# Altium footprint library basicfootprints.PcbLib: 522 footprints (part 26 of 33)
Each footprint in its own frame and in the unit in brackets; x right, y up, seen from the top. Pads: shape width x height; smd on the part's side, far side on the other; paste and mask are expansions set on the pad; w line width, h text height; cw(c..) or ccw(c..) is an arc to the next point about the centre after c.
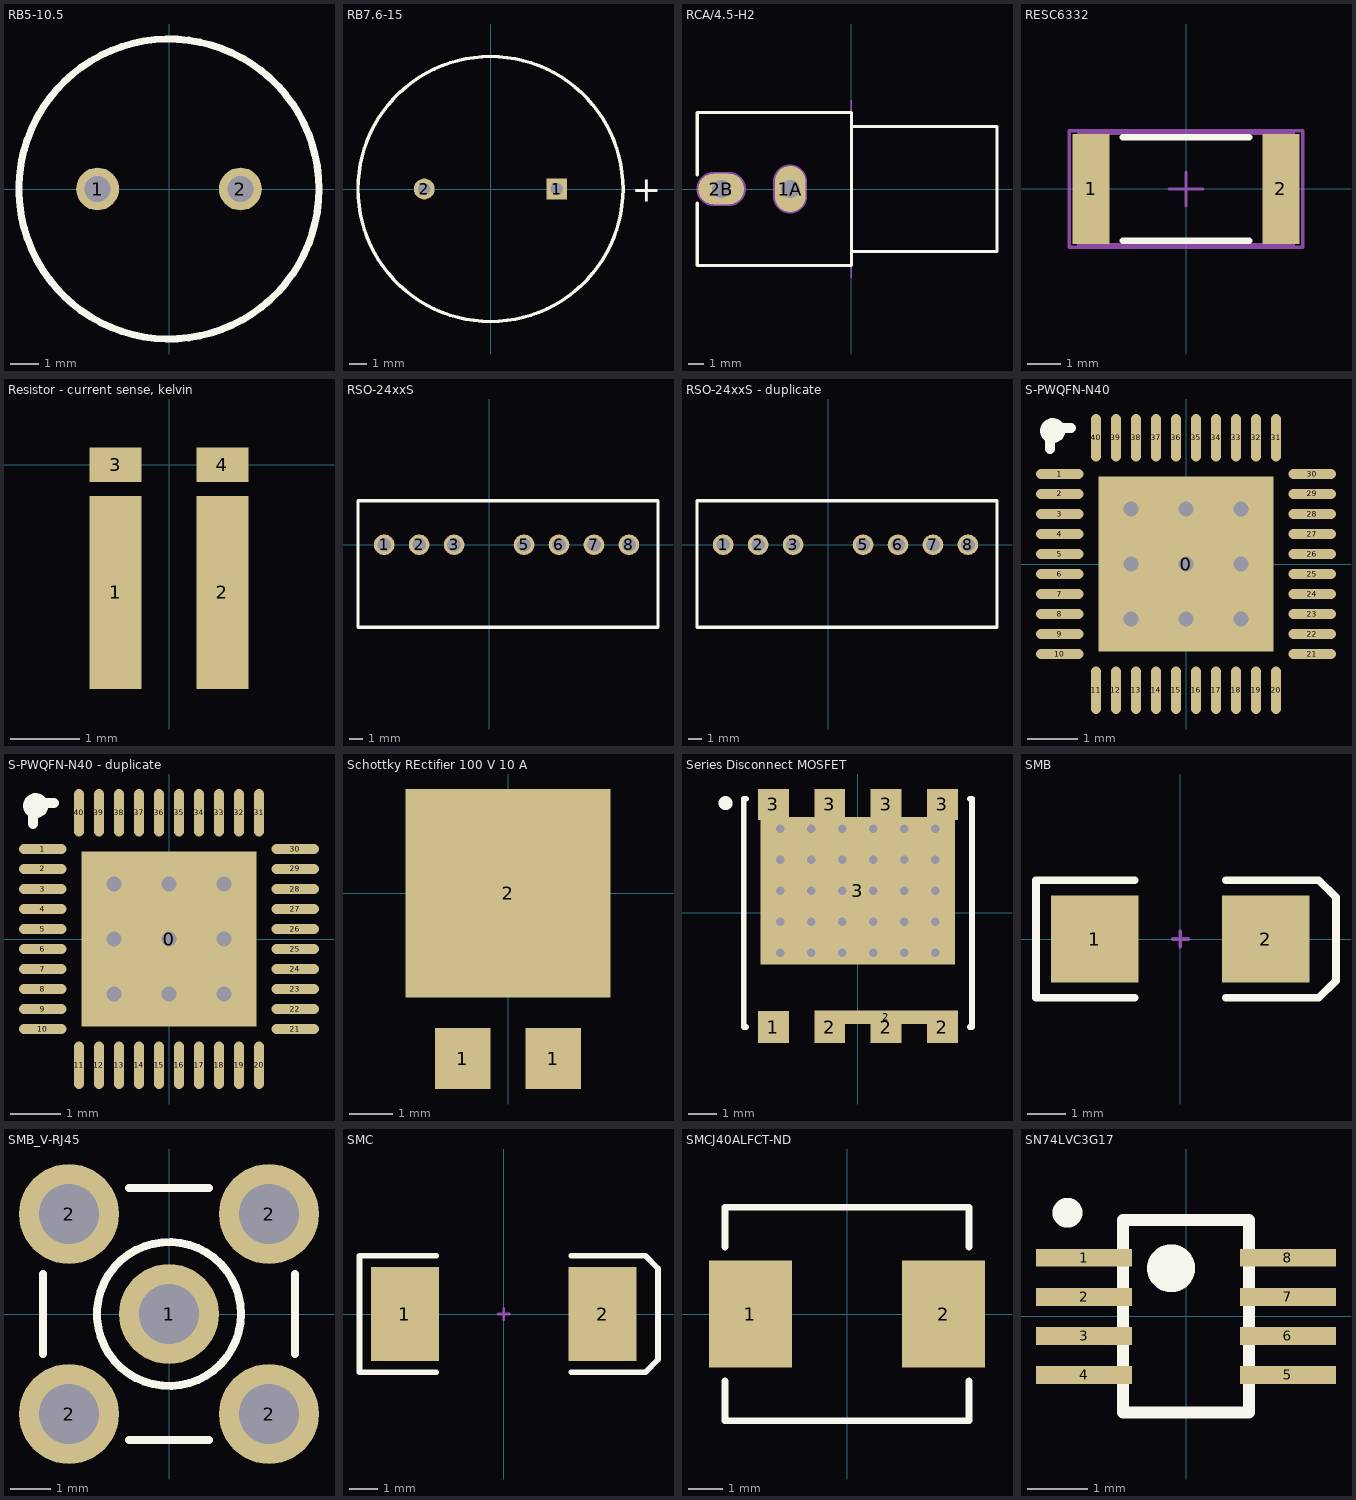
[diagram p25: the footprints below, top view; thin cyan lines are the x and y axes]

## RB5-10.5 [mm] "Capacitor (Radial); 2 Leads"
pads (2):
  round 1.5 hole 0.9: 1(-2.5,0) 2(2.5,0)
Top Overlay:
  circle w0.25: c0,0 r5.25
Mechanical 1:
  circle w0.02: c0,0 r5.25

## RB7.6-15 [mm] "Polarized Capacitor (Radial); 2 Leads"
pads (2):
  rect 1.2x1.2 hole 0.7: 1(3.81,0)
  round 1.2 hole 0.7: 2(-3.81,0)
Top Overlay:
  circle w0.2: c0,0 r7.62
  text "+" at 8.132,-0.737 h1.5

## RCA/4.5-H2 [mm] "Two Conductor Jack (RCA), Right Angle, Thru-Hole, Body 10 x 10 x 13 mm (WxTxH)"
height 13
pads (2):
  oval 2x3 hole 1.2: 1A(-4,0)
  oval 3x2 hole 1.2: 2B(-8.496,0)
Top Overlay:
  lines w0.2: -10.075,5 -0.018,5 ; -10.057,-0.92 -10.057,-5 0,-5 0,5 ; -10.057,0.92 -10.057,5 ; 0,-4.065 9.5,-4.065 9.5,4.065 0,4.065
Mechanical 1:
  lines w0.1: 0,-5.8 0,5.8
  lines w1.2: -8.996,0 -7.996,0 ; -4,-0.5 -4,0.5
  text "Mech 2 - Clearance, move to internal plane if present" at -10.057,6.342 h0.3
  text "Mech 1 - Slot cut-out" at -10.057,6.842 h0.3
  text "Assign keep-out area to slot" at -10.057,8.342 h0.3
  text "Slot 1.2x2.2mm, PTH" at -10.057,7.342 h0.3
  text "Alert PCB fab to slot details" at -10.057,7.842 h0.3
  text "PCB Edge" at -0.333,-4.618 h0.25
Mechanical 2:
  lines w2.216: -8.996,0 -7.996,0 ; -4,-0.5 -4,0.5

## RESC6332 [mm] "Chip Resistor, Body 6.3x3.2mm, IPC High Density"
height 0.9
pads (2):
  rect 1.1x3.3 smd: 1(-2.85,0) 2(2.85,0)
Top Overlay:
  lines w0.2: -1.9,-1.55 1.9,-1.55 ; -1.9,1.55 1.9,1.55
Mechanical 13:
  lines w0.1: -3.225,-1.675 3.225,-1.675 3.225,1.675 -3.225,1.675 -3.225,-1.675
Mechanical 15:
  lines w0.1: -0.5,0 0.5,0 ; 0,-0.5 0,0.5 ; -3.5,-1.75 3.5,-1.75 3.5,1.75 -3.5,1.75 -3.5,-1.75
3D body: height 0.9, standoff 0, extent -3.225,-1.675 3.225,1.675

## Resistor - current sense, kelvin [mm] "KRL3216T4A-M-R003-F-T1"
pads (4):
  rect 0.75x2.8 smd mask+0.05: 1(-0.775,-1.85) 2(0.775,-1.85)
  rect 0.75x0.5 smd mask+0.05: 3(-0.775,0) 4(0.775,0)
3D body: height 0.7, standoff 0, extent -0.889,-3.175 0.889,0.191

## RSO-24xxS [mm] "Isolated 18-36Vin, 2W, xxVout"
pads (7):
  round 1.5 hole 1: 1(-7.62,0) 2(-5.08,0) 3(-2.54,0) 5(2.54,0) 6(5.08,0) 7(7.62,0) 8(10.16,0)
Top Overlay:
  lines w0.254: -9.525,-6 12.275,-6 12.275,3.2 -9.525,3.2 -9.525,-6
3D body: height 11.1, standoff 0.5, extent -9.525,-5.969 12.319,3.175

## RSO-24xxS - duplicate [mm] "Isolated 18-36Vin, 2W, xxVout"
pads (7):
  round 1.5 hole 1: 1(-7.62,0) 2(-5.08,0) 3(-2.54,0) 5(2.54,0) 6(5.08,0) 7(7.62,0) 8(10.16,0)
Top Overlay:
  lines w0.254: -9.525,-6 -9.525,3.2 12.275,3.2 12.275,-6 -9.525,-6
3D body: height 11.1, standoff 0.5, extent -9.525,-5.969 12.319,3.175

## S-PWQFN-N40 [mm] "MSP430F5172"
height 0.8
pads (41):
  rect 3.5x3.5 smd: 0(0,0)
  oval 0.95x0.2 smd mask+0.05: 1(-2.525,1.8) 2(-2.525,1.4) 3(-2.525,1) 4(-2.525,0.6) 5(-2.525,0.2) 6(-2.525,-0.2) 7(-2.525,-0.6) 8(-2.525,-1) 9(-2.525,-1.4) 10(-2.525,-1.8) 21(2.525,-1.8) 22(2.525,-1.4) 23(2.525,-1) 24(2.525,-0.6) 25(2.525,-0.2) 26(2.525,0.2) 27(2.525,0.6) 28(2.525,1) 29(2.525,1.4) 30(2.525,1.8)
  oval 0.2x0.95 smd mask+0.05: 11(-1.8,-2.525) 12(-1.4,-2.525) 13(-1,-2.525) 14(-0.6,-2.525) 15(-0.2,-2.525) 16(0.2,-2.525) 17(0.6,-2.525) 18(1,-2.525) 19(1.4,-2.525) 20(1.8,-2.525) 31(1.8,2.525) 32(1.4,2.525) 33(1,2.525) 34(0.6,2.525) 35(0.2,2.525) 36(-0.2,2.525) 37(-0.6,2.525) 38(-1,2.525) 39(-1.4,2.525) 40(-1.8,2.525)
via 1.1,-1.1 diameter 0.5 hole 0.3
via 0,-1.1 diameter 0.5 hole 0.3
via -1.1,-1.1 diameter 0.5 hole 0.3
via 1.1,0 diameter 0.5 hole 0.3
via 0,0 diameter 0.5 hole 0.3
via -1.1,0 diameter 0.5 hole 0.3
via 1.1,1.1 diameter 0.5 hole 0.3
via 0,1.1 diameter 0.5 hole 0.3
via -1.1,1.1 diameter 0.5 hole 0.3
Top Overlay:
  circle w0.25: c-2.667,2.667 r0.125
  lines w0.2: -2.725,2.3 -2.725,2.725 -2.3,2.725
3D body: height 0.8, standoff 0.2, extent -2.575,-2.575 2.575,2.575

## S-PWQFN-N40 - duplicate [mm] "MSP430F5172"
height 0.8
pads (41):
  rect 3.5x3.5 smd: 0(0,0)
  oval 0.95x0.2 smd mask+0.05: 1(-2.525,1.8) 2(-2.525,1.4) 3(-2.525,1) 4(-2.525,0.6) 5(-2.525,0.2) 6(-2.525,-0.2) 7(-2.525,-0.6) 8(-2.525,-1) 9(-2.525,-1.4) 10(-2.525,-1.8) 21(2.525,-1.8) 22(2.525,-1.4) 23(2.525,-1) 24(2.525,-0.6) 25(2.525,-0.2) 26(2.525,0.2) 27(2.525,0.6) 28(2.525,1) 29(2.525,1.4) 30(2.525,1.8)
  oval 0.2x0.95 smd mask+0.05: 11(-1.8,-2.525) 12(-1.4,-2.525) 13(-1,-2.525) 14(-0.6,-2.525) 15(-0.2,-2.525) 16(0.2,-2.525) 17(0.6,-2.525) 18(1,-2.525) 19(1.4,-2.525) 20(1.8,-2.525) 31(1.8,2.525) 32(1.4,2.525) 33(1,2.525) 34(0.6,2.525) 35(0.2,2.525) 36(-0.2,2.525) 37(-0.6,2.525) 38(-1,2.525) 39(-1.4,2.525) 40(-1.8,2.525)
via 1.1,-1.1 diameter 0.5 hole 0.3
via 0,-1.1 diameter 0.5 hole 0.3
via -1.1,-1.1 diameter 0.5 hole 0.3
via 1.1,0 diameter 0.5 hole 0.3
via 0,0 diameter 0.5 hole 0.3
via -1.1,0 diameter 0.5 hole 0.3
via 1.1,1.1 diameter 0.5 hole 0.3
via 0,1.1 diameter 0.5 hole 0.3
via -1.1,1.1 diameter 0.5 hole 0.3
Top Overlay:
  circle w0.25: c-2.667,2.667 r0.125
  lines w0.2: -2.725,2.3 -2.725,2.725 -2.3,2.725
3D body: height 0.8, standoff 0.2, extent -2.575,-2.575 2.575,2.575

## Schottky REctifier 100 V 10 A [mm] "V10P10"
pads (3):
  rect 1.27x1.4 smd: 1(-1.04,-3.805) 1(1.04,-3.805)
  rect 4.72x4.8 smd: 2(0,0)
3D body: height 3, standoff 0.38, extent -2.413,-3.302 2.413,2.159

## Series Disconnect MOSFET [mm] "BQ76200PWR"
height 0.3
pads (10):
  rect 1.1x1.13 smd: 1(-3,-4.05) 2(-1,-4.05) 2(1,-4.05) 2(3,-4.05)
  rect 5.1x0.48 smd: 2(1,-3.7)
  rect 1.1x1.1 smd: 3(-3,3.85) 3(-1,3.85) 3(1,3.85) 3(3,3.85)
  rect 6.9x5.23 smd: 3(0,0.785)
via -2.75,2.985 diameter 0.6 hole 0.3
via -1.65,2.985 diameter 0.6 hole 0.3
via -0.55,2.985 diameter 0.6 hole 0.3
via 0.55,2.985 diameter 0.6 hole 0.3
via 1.65,2.985 diameter 0.6 hole 0.3
via 2.75,2.985 diameter 0.6 hole 0.3
via -2.75,1.885 diameter 0.6 hole 0.3
via -1.65,1.885 diameter 0.6 hole 0.3
via -0.55,1.885 diameter 0.6 hole 0.3
via 0.55,1.885 diameter 0.6 hole 0.3
via 1.65,1.885 diameter 0.6 hole 0.3
via 2.75,1.885 diameter 0.6 hole 0.3
via -2.75,0.785 diameter 0.6 hole 0.3
via -1.65,0.785 diameter 0.6 hole 0.3
via -0.55,0.785 diameter 0.6 hole 0.3
via 0.55,0.785 diameter 0.6 hole 0.3
via 1.65,0.785 diameter 0.6 hole 0.3
via 2.75,0.785 diameter 0.6 hole 0.3
via -2.75,-0.315 diameter 0.6 hole 0.3
via -1.65,-0.315 diameter 0.6 hole 0.3
via -0.55,-0.315 diameter 0.6 hole 0.3
via 0.55,-0.315 diameter 0.6 hole 0.3
via 1.65,-0.315 diameter 0.6 hole 0.3
via 2.75,-0.315 diameter 0.6 hole 0.3
via -2.75,-1.415 diameter 0.6 hole 0.3
via -1.65,-1.415 diameter 0.6 hole 0.3
via -0.55,-1.415 diameter 0.6 hole 0.3
via 0.55,-1.415 diameter 0.6 hole 0.3
via 1.65,-1.415 diameter 0.6 hole 0.3
via 2.75,-1.415 diameter 0.6 hole 0.3
Top Overlay:
  circle w0.25: c-4.7,3.9 r0.125
  lines w0.2: -4.05,-0.025 -4.05,4.05 -3.975,4.05 ; -4.05,0.025 -4.05,-4.05 -3.975,-4.05 ; 3.975,-4.05 4.05,-4.05 4.05,0.025 ; 3.975,4.05 4.05,4.05 4.05,-0.025
3D body: height 0.3, standoff 0, extent -4.05,-4.05 4.05,4.05

## SMB [mm] "DO-214-AA/SMB; 2 C-Bend Leads; Body 5.3 x 3.6 mm, inc. leads (LxW)"
height 2.54
pads (2):
  rect 2.3x2.3 smd: 1(-2.25,0) 2(2.25,0)
Top Overlay:
  lines w0.2: -1.2,-1.55 -3.8,-1.55 -3.8,1.55 -1.2,1.55 ; 1.2,-1.55 3.65,-1.55 4.1,-1.1 4.1,1.1 3.65,1.55 1.2,1.55
Mechanical 1:
  lines w0.1: -0.2,0 0.2,0 ; 0,-0.2 0,0.2

## SMB_V-RJ45 [mm] "Connector; SMB Straight"
pads (5):
  round 2.5 hole 1.5: 1(0,0) 2(-2.5,-2.5) 2(-2.5,2.5) 2(2.5,-2.5) 2(2.5,2.5)
Top Overlay:
  circle w0.2: c0,0 r1.8
  lines w0.2: -3.15,-1 -3.15,1 ; -1,-3.15 1,-3.15 ; -1,3.15 1,3.15 ; 3.15,-1 3.15,1
Mechanical 1:
  circle w0.025: c0,0 r0.2
  circle w0.025: c0,0 r1.05
  circle w0.025: c0,0 r1.8

## SMC [mm] "DO-214-AB/SMC; 2 C-Bend Leads; Body 7.9 x 5.9 mm, inc. leads (LxW)"
height 2.65
pads (2):
  rect 2.4x3.3 smd: 1(-3.475,0) 2(3.475,0)
Top Overlay:
  lines w0.2: -2.375,-2.05 -5.075,-2.05 -5.075,2.05 -2.375,2.05 ; 2.375,-2.05 4.975,-2.05 5.425,-1.6 5.425,1.6 4.975,2.055 ; 2.375,2.05 4.975,2.05
Mechanical 1:
  lines w0.1: -0.2,0 0.2,0 ; 0,-0.2 0,0.2

## SMCJ40ALFCT-ND [mm] "40V Zener TVS"
height 2.62
pads (2):
  rect 2.45x3.15 smd: 1(-2.85,0) 2(2.85,0)
Top Overlay:
  lines w0.2: -3.6,-1.975 -3.6,-3.15 3.6,-3.15 3.6,-1.975 ; -3.6,1.975 -3.6,3.15 3.6,3.15 3.6,1.975
3D body: height 2.62, standoff 0, extent -3.555,-3.11 3.555,3.11

## SN74LVC3G17 [mm] "Schmitt buffer 3-ch"
height 1.3
pads (8):
  rect 1.6x0.3 smd: 1(-1.7,0.975) 2(-1.7,0.325) 3(-1.7,-0.325) 4(-1.7,-0.975) 5(1.7,-0.975) 6(1.7,-0.325) 7(1.7,0.325) 8(1.7,0.975)
Top Overlay:
  circle w0.25: c-1.975,1.725 r0.125
  circle w0.4: c-0.25,0.8 r0.2
  lines w0.2: -1.05,-1.6 -1.05,1.6 1.05,1.6 1.05,-1.6 -1.05,-1.6
3D body: height 1.3, standoff 0, extent -1.45,-1.6 1.45,1.6